# Altium schematic symbol library Schlib.SchLib: 107 symbols (part 2 of 3)
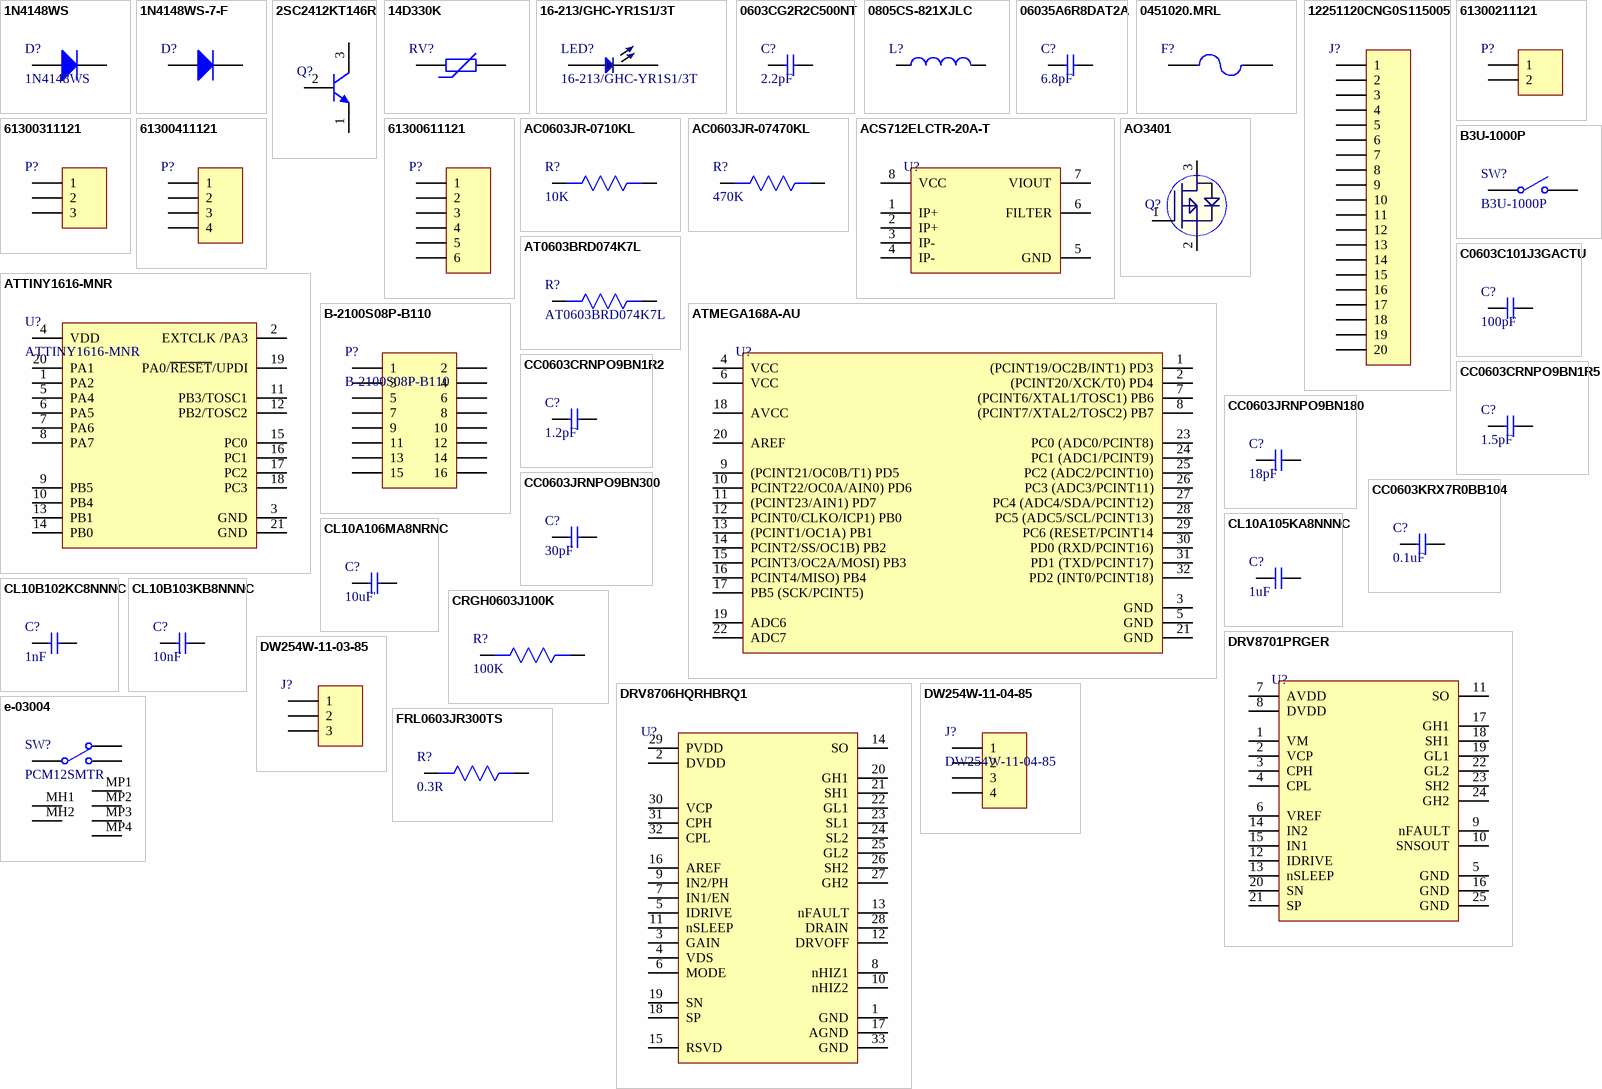
[diagram p3: symbols 1N4148WS to FRL0603JR300TS]

## DRV8701PRGER
designator U?
IC MOTOR DRIVER 0V-5.5V 24VQFN; Manufacturer: Texas Instruments; Manufacturer Part Number: DRV8701PRGER; Interface: PWM; Supplier 1: Mouser; RoHS: Yes; Category: Motor Drivers; Pricing 1: 1=2.52000, 10=2.28000, 25=2.15000, 50=2.15000, 100=1.83000, 250=1.72000, 500=1.51000, 1000=1.25000, 10000=1.25000 (USD); Mount: Surface Mount; Case/Package: VQFN; Min Operating Temperature: -40°C; Max Operating Temperature: 125°C; Packaging: Tape and Reel; Lead Free: Lead Free; RoHS Compliant: Yes; ComponentLink1URL: http://www.ti.com/lit/ds/symlink/drv8701.pdf?src-supplier=Digi-Key; ComponentLink1Description: http://www.ti.com/lit/ds/symlink/drv8701.pdf?src-supplier=Digi-Key; ComponentLink2URL: http://www.ti.com/general/docs/suppproductinfo.tsp?distId=10&amp;gotoUrl=http%3A%2F%2Fwww.ti.com%2Flit%2Fgpn%2Fdrv8701&src-supplier=Digi-Key; ComponentLink2Description: http://www.ti.com/general/docs/suppproductinfo.tsp?distId=10&amp;gotoUrl=http%3A%2F%2Fwww.ti.com%2Flit%2Fgpn%2Fdrv8701&src-supplier=Digi-Key; ComponentLink3URL: http://www.ti.com/general/docs/lit/getliterature.tsp?genericPartNumber=DRV8701&&fileType=pdf&src-supplier=Avnet; ComponentLink3Description: http://www.ti.com/general/docs/lit/getliterature.tsp?genericPartNumber=DRV8701&&fileType=pdf&src-supplier=Avnet; Supplier Part Number 1: 595-DRV8701PRGER
footprint 24-VQFN (4x4)
pins: 1 VM, 2 VCP, 3 CPH, 4 CPL, 5 GND, 6 VREF, 7 AVDD, 8 DVDD, 9 nFAULT, 10 SNSOUT, 11 SO, 12 IDRIVE, 13 nSLEEP, 14 IN2, 15 IN1, 16 GND, 17 GH1, 18 SH1, 19 GL1, 20 SN, 21 SP, 22 GL2, 23 SH2, 24 GH2, 25 GND

## DRV8706HQRHBRQ1
designator U?
AUTOMOTIVE 40-V H-BRIDGE SMART G; Manufacturer: Texas Instruments; Manufacturer Part Number: DRV8706HQRHBRQ1; Supplier 1: Mouser; RoHS: Yes; Pricing 1: 1=2.87000, 10=2.58000, 50=2.44000, 100=2.11000, 1000=1.57000, 10000=1.56000 (USD); Supplier Part Number 1: 595-DRV8706HQRHBRQ1
footprint 32 QFN (5x5)
pins: 1 GND, 2 DVDD, 3 GAIN, 4 VDS, 5 IDRIVE, 6 MODE, 7 IN1/EN, 8 nHIZ1, 9 IN2/PH, 10 nHIZ2, 11 nSLEEP, 12 DRVOFF, 13 nFAULT, 14 SO, 15 RSVD, 16 AREF, 17 AGND, 18 SP, 19 SN, 20 GH1, 21 SH1, 22 GL1, 23 SL1, 24 SL2, 25 GL2, 26 SH2, 27 GH2, 28 DRAIN, 29 PVDD, 30 VCP, 31 CPH, 32 CPL, 33 GND

## DW254W-11-03-85
designator J?
3 PIN 2.54mm 3A Female Headers ROHS; Manufacturer: DEALON; Manufacturer Part Number: DW254W-11-03-85; Insulation Height: 8.5mm; ComponentLink1Description: LCSC; ComponentLink1URL: https://lcsc.com/product-detail/span-style-background-color-ff0-Female-span-Headers_DEALON-DW254W-11-03-85_C2935993.html; Footprint: Custom
footprint DW254W-11-03-85 (3 pin  2.54mm 3A  Female Headers ROHS)
pins: 1, 2, 3

## DW254W-11-04-85
designator J?
4 PIN 2.54mm 3A Female Headers; Manufacturer: DEALON; Holes Structure: 1x4P; Holes Direction: side; Pitch: 2.54mm; Current Rating (Max): 3A; Mounting Type: Shrouded; ComponentLink1Description: LCSC; ComponentLink1URL: https://lcsc.com/product-detail/span-style-background-color-ff0-Female-span-Headers_DEALON-DW254W-11-04-85_C2935994.html
footprint DW254W-11-04-85 (2.54mm 3A Shrouded 1x4P side 8.5mm 4 1 Square Holes Plugin,P=2.54mm Female Headers ROHS)
pins: 1, 2, 3, 4

## e-03004
designator SW?, comment PCM12SMTR
SWITCH SLIDE SPDT 300MA 6V; Manufacturer: ITT C&K; Mechanical Life: 10000Cycles; Actuator Material: Nylon,Polyamide; Contact Resistance: 70mR; Insulation Resistance: 100mR; Switch Travel: 1.5mm; Switch Function: On-On; Actuator Type: Standard; Supplier 1: Digi-Key; Manufacturer Part Number: PCM12SMTR; Stock 1: 33578; Pricing 1: 1=0.91, 10=0.87, 25=0.8524, 50=0.7616, 100=0.7253, 250=0.7072, 500=0.5984, 1000=0.58027 (USD); Mount: Surface Mount; Contact Material: Copper Alloy,Copper,Silver; Contact Plating: Silver; Min Operating Temperature: -20°C; Max Operating Temperature: 85°C; Throw Configuration: SPDT; Max Voltage Rating (DC): 6V; Termination: Gull Wing; Voltage Rating (AC): 6V; Package Quantity: 1; Packaging: Tape and Reel; Voltage Rating (DC): 6V; Max Current Rating: 300mA; Contact Current Rating: 300mA; Current Rating: 300mA; Orientation: Right Angle; Length: 7.7mm; Width: 6.7mm; Depth: 5mm; Actuator Length: 1.5mm; REACH SVHC: No SVHC; Lead Free: Lead Free; ComponentLink1URL: https://www.ckswitches.com/media/1424/pcm.pdf?src-supplier=Digi-Key; ComponentLink1Description: https://www.ckswitches.com/media/1424/pcm.pdf?src-supplier=Digi-Key; ComponentLink2URL: https://products.avnet.com/shop/en/asia/switches-and-relays/switches/slide-switch/www.ckswitches.com/media/1424/pcm.pdf?src-supplier=Avnet+Asia; ComponentLink2Description: https://products.avnet.com/shop/en/asia/switches-and-relays/switches/slide-switch/www.ckswitches.com/media/1424/pcm.pdf?src-supplier=Avnet+Asia; ComponentLink3URL: http://www1.futureelectronics.com/doc/C%20&%20K%20COMPONENTS/PCM12SMTR.pdf?src-supplier=Future+Electronics; ComponentLink3Description: http://www1.futureelectronics.com/doc/C%20&%20K%20COMPONENTS/PCM12SMTR.pdf?src-supplier=Future+Electronics; ComponentLink4URL: http://www.farnell.com/datasheets/1789487.pdf?src-supplier=Onlinecomponents.com; ComponentLink4Description: http://www.farnell.com/datasheets/1789487.pdf?src-supplier=Onlinecomponents.com; ComponentLink5URL: http://www.farnell.com/datasheets/1789487.pdf?src-supplier=Element14; ComponentLink5Description: http://www.farnell.com/datasheets/1789487.pdf?src-supplier=Element14; ComponentLink6URL: http://www.farnell.com/datasheets/1789487.pdf?src-supplier=Mouser; ComponentLink6Description: http://www.farnell.com/datasheets/1789487.pdf?src-supplier=Mouser; Supplier Part Number 1: 401-2016-1-ND
footprint PCM12SMTR (SWITCH SLIDE SPDT 300MA 6V)
pins: 1, 2, 3, MH1, MH2, MP1, MP2, MP3, MP4

## FRL0603JR300TS
designator R?, comment 0.3R
1/10W Thick Film Resistors ±5% ±300ppm/℃ 0.3Ω -55℃~+155℃ 0603 Chip Resistor - Surface Mount ROHS; Manufacturer: FOJAN; Manufacturer Part Number: FRL0603JR300TS; ComponentLink1Description: LCSC; ComponentLink1URL: https://lcsc.com/product-detail/Chip-span-style-background-color-ff0-Resistor-span-Surface-Mount_FOJAN-FRL0603JR300TS_C2934256.html; Footprint: 0603
footprint Res0603
pins: 1, 2

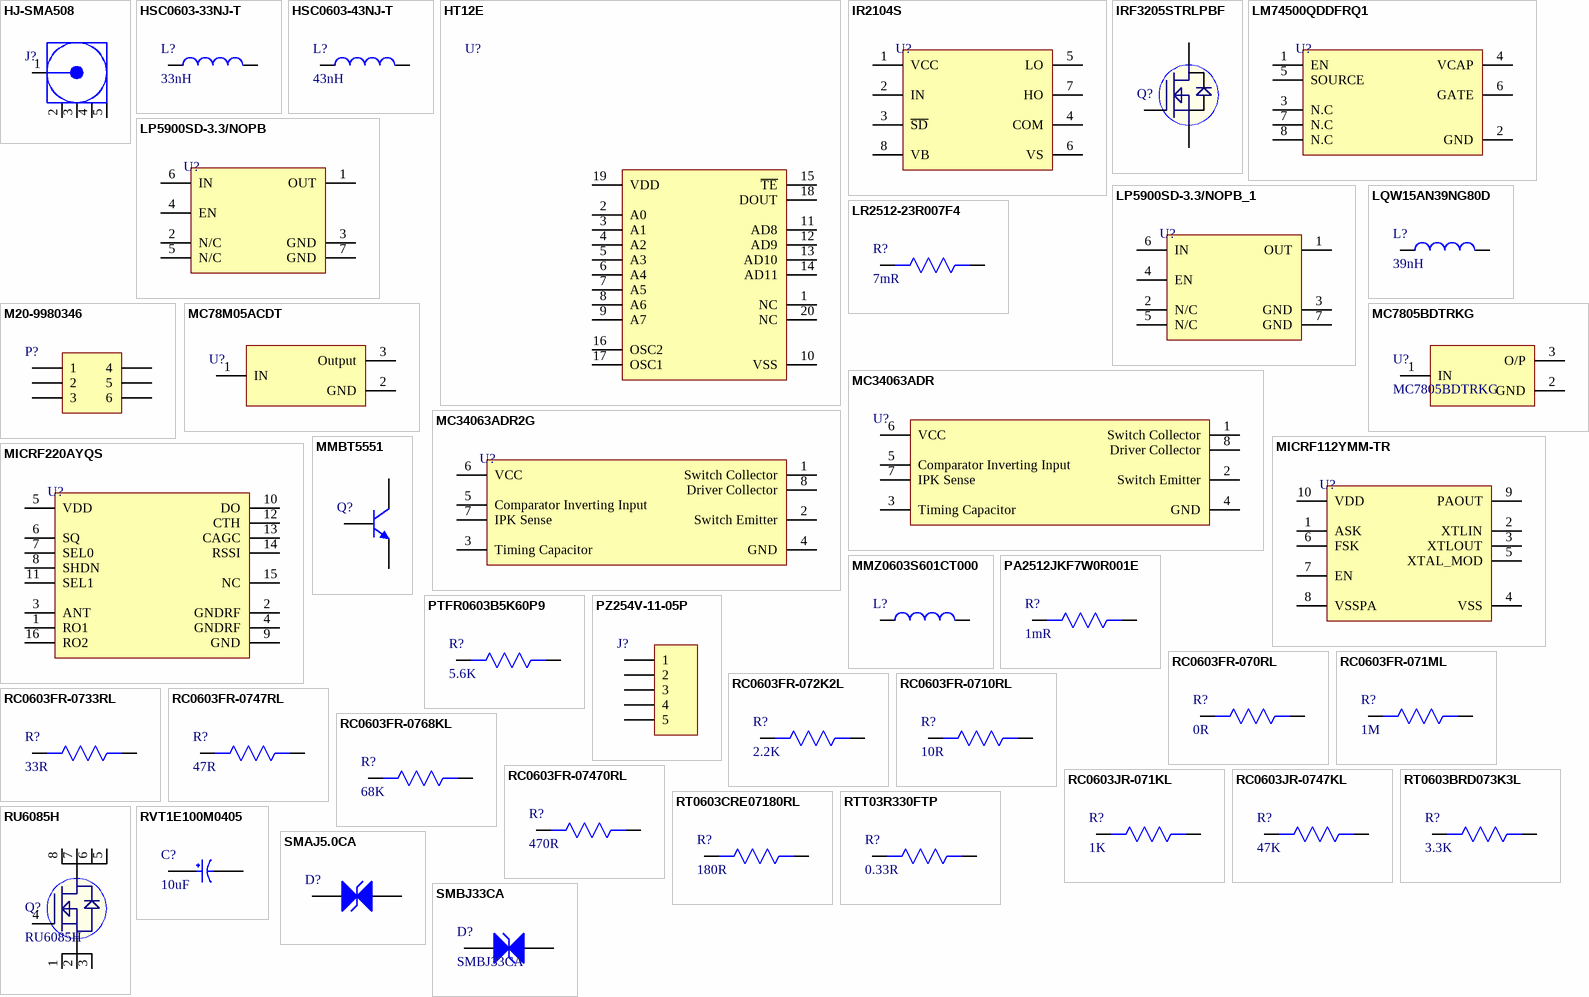
[diagram p1: symbols HJ-SMA508 to SMBJ33CA]

## HJ-SMA508
designator J?
1 Inner bore SMA Board Edge Bend -55℃~+155℃ 50Ω Plugin RF Connectors / Coaxial Connectors ROHS; Manufacturer: HJ Tech; Manufacturer Part Number: HJ-SMA508; Footprint: Custom; ComponentLink1Description: LCSC; ComponentLink1URL: https://lcsc.com/product-detail/RF-Connectors-Coaxial-Connectors_HJ-Tech-HJ-SMA508_C1509209.html
footprint HJ-SMA508
pins: 1 Signal "Signal Pin", 2 GND, 3 GND, 4 GND, 5 GND

## HSC0603-33NJ-T
designator L?, comment 33nH
600mA 33nH ±5% 220mΩ SMD,1.8x1.2x1.02mm Inductors (SMD) ROHS; Manufacturer: EMTEK; Manufacturer Part Number: HSC0603-33NJ-T; Value: 33nH; ComponentLink1Description: LCSC; ComponentLink1URL: https://www.lcsc.com/product-detail/Inductors-span-style-background-color-ff0-SMD-span_EMTEK-HSC0603-33NJ-T_C251779.html
footprint IND 0603
pins: 1, 2

## HSC0603-43NJ-T
designator L?, comment 43nH
600mA 43nH ±5% 280mΩ 0603 Inductors (SMD) ROHS; Manufacturer: EMTEK; Manufacturer Part Number: HSC0603-43NJ-T; Footprint: 0603; ComponentLink1Description: LCSC; ComponentLink1URL: https://www.lcsc.com/product-detail/Inductors-span-style-background-color-ff0-SMD-span_EMTEK-HSC0603-43NJ-T_C251785.html
footprint IND 0603
pins: 1, 2

## HT12E
designator U?
Remote Control Encoder, SMD, SOIC20; Manufacturer: Holtek; Manufacturer Part Number: HT12E-20SOP; Min Supply Voltage: 2.4V; Max Supply Voltage: 12V; Nominal Supply Current: 150uA; Supplier 1: RSComponents; RoHS: Yes; Category: Integrated Circuits (ICs); Stock 1: 1; Pricing 1: 38=1.61900, 76=1.41400, 190=1.33600, 380=1.30900, 760=1.28200 (USD); Case/Package: SOP; Number of Pins: 20; Min Operating Temperature: -20°C; Max Operating Temperature: 75°C; Length: 12.8mm; Width: 7.5mm; Height: 2.35mm; REACH SVHC: No SVHC; ComponentLink1URL: https://datasheet.ciiva.com/1167/57851-1167180.pdf?src-supplier=Element14; ComponentLink1Description: https://datasheet.ciiva.com/1167/57851-1167180.pdf?src-supplier=Element14; Supplier Part Number 1: 8850709
footprint SOP-20 (300 Mil)
pins: 1 NC, 2 A0, 3 A1, 4 A2, 5 A3, 6 A4, 7 A5, 8 A6, 9 A7, 10 VSS, 11 AD8, 12 AD9, 13 AD10, 14 AD11, 15 ~{TE}, 16 OSC2, 17 OSC1, 18 DOUT, 19 VDD, 20 NC

## IR2104S
designator U?
IC DRIVER HIGH/LOW SIDE 8SOIC; Manufacturer: Infineon; Manufacturer Part Number: IR2104STRPBF; Number of Outputs: 2; Max Output Current: 360mA; Min Supply Voltage: 10V; Max Supply Voltage: 20V; Fall Time: 90ns; Propagation Delay: 680ns; Channel Type: Synchronous; Supplier 1: Newark; RoHS: Yes; Category: Gate Drivers; Stock 1: 1645; Pricing 1: 1=3.54000, 10=3.19000, 25=3.01000 (USD); Mount: Surface Mount; Case/Package: SOIC; Number of Pins: 8; Min Operating Temperature: -40°C; Max Operating Temperature: 150°C; Package Quantity: 1; Packaging: Cut Tape; Number of Drivers: 2; Output Current: 360mA; Number of Channels: 2; Length: 0.196inch; Width: 0.157inch; Height: 0.059inch; RoHS Compliant: Yes; REACH SVHC: No SVHC; Lead Free: Lead Free; Halogen Free: Not Halogen Free; Supplier Part Number 1: 40M8006
footprint SOIC-8
pins: 1 VCC, 2 IN, 3 ~{SD}, 4 COM, 5 LO, 6 VS, 7 HO, 8 VB

## IRF3205STRLPBF
designator Q?
MOSFET N-CH 55V 110A D2PAK; Manufacturer: Infineon; Manufacturer Part Number: IRF3205STRLPBF; Input Capacitance: 3.247nF; Power Dissipation: 200W; Gate to Source Voltage (Vgs): 20V; Rds On Max: 8mR; Turn-Off Delay Time: 50ns; Turn-On Delay Time: 14ns; Threshold Voltage: 4V; Supplier 1: Newark; RoHS: Yes; Category: MOSFETs; Pricing 1: 1=2.87000, 10=2.59000, 25=2.42000, 50=2.25000, 100=2.09000, 250=1.90000, 500=1.71000 (USD); Mount: Surface Mount; Case/Package: D2PAK; Number of Pins: 3; Min Operating Temperature: -55°C; Max Operating Temperature: 175°C; Packaging: Cut Tape; Continuous Drain Current (ID): 110A; Drain to Source Breakdown Voltage: 55V; Drain to Source Voltage (Vdss): 55V; Max Power Dissipation: 200W; Drain to Source Resistance: 8mR; Max Dual Supply Voltage: 55V; Length: 0.42inch; Width: 0.38inch; Height: 0.19inch; Lead Free: Contains Lead; RoHS Compliant: Yes; REACH SVHC: No SVHC; Halogen Free: Halogen Free; Supplier Part Number 1: 42Y0386
footprint D2PAK
pins: 1 G, 2 D, 3 S

## LM74500QDDFRQ1
designator U?
REVERSE POLARITY PROTECTION CONT; Manufacturer: Texas Instruments; Manufacturer Part Number: LM74500QDDFRQ1; Supplier 1: Mouser; RoHS: No; Category: Battery Management; Pricing 1: 1=1.77000, 10=1.60000, 50=1.51000, 100=1.29000, 1000=0.87600, 10000=0.87500 (USD); Supplier Part Number 1: 595-LM74500QDDFRQ1
footprint TSOT-23-8
pins: 1 EN, 2 GND, 3 N.C, 4 VCAP, 5 SOURCE, 6 GATE, 7 N.C, 8 N.C

## LP5900SD-3.3/NOPB
designator U?
IC REG LINEAR 3.3V 150MA 6WSON; Manufacturer: TI National Semiconductor; Manufacturer Part Number: LP5900SD-3.3/NOPB; Dropout Voltage: 80mV; Number of Outputs: 1; Min Input Voltage: 2.5V; Max Input Voltage: 5.5V; Polarity: Positive; Quiescent Current: 50uA; Output Voltage Accuracy: 2%; Output Type: Fixed; Max Supply Current: 230uA; Power Supply Rejection Ratio (PSRR): 40dB; Supplier 1: Digi-Key; RoHS: Yes; Category: Voltage Regulators - Linear; Stock 1: 36260; Pricing 1: 1=1.01000, 10=0.90700, 25=0.86080, 100=0.70700, 250=0.66092, 500=0.58406 (USD); Mount: Surface Mount; Number of Pins: 6; Min Operating Temperature: -40°C; Max Operating Temperature: 85°C; Output Voltage: 3.3V; Output Current: 150mA; Package Quantity: 1000; Packaging: Tape and Reel; Max Output Current: 150mA; Nominal Output Voltage: 3.3V; Accuracy: 2%; Series: -; Number of Regulators: 1; Max Supply Voltage: 5.5V; Min Supply Voltage: 2.5V; Termination: SMD/SMT; Output Configuration: Positive; Length: 2.2mm; Width: 2.5mm; Height: 0.8mm; Radiation Hardening: No; REACH SVHC: No SVHC; Lead Free: Lead Free; ComponentLink1URL: https://datasheet.ciiva.com/3223/lp5900-3223991.pdf?src-supplier=Avnet; ComponentLink1Description: https://datasheet.ciiva.com/3223/lp5900-3223991.pdf?src-supplier=Avnet; ComponentLink2URL: https://datasheet.ciiva.com/6598/lp5900-6598143.pdf?src-supplier=Digi-Key; ComponentLink2Description: https://datasheet.ciiva.com/6598/lp5900-6598143.pdf?src-supplier=Digi-Key; ComponentLink3URL: https://datasheet.ciiva.com/6598/lp5900-6598142.pdf?src-supplier=Digi-Key; ComponentLink3Description: https://datasheet.ciiva.com/6598/lp5900-6598142.pdf?src-supplier=Digi-Key; Supplier Part Number 1: LP5900SD-3.3/NOPBCT-ND
footprint WSON-6
pins: 1 OUT, 2 N/C, 3 GND, 4 EN, 5 N/C, 6 IN, 7 GND

## LP5900SD-3.3/NOPB_1
designator U?
IC REG LINEAR 3.3V 150MA 6WSON; Manufacturer: TI National Semiconductor; Manufacturer Part Number: LP5900SD-3.3/NOPB; Dropout Voltage: 80mV; Number of Outputs: 1; Min Input Voltage: 2.5V; Max Input Voltage: 5.5V; Polarity: Positive; Quiescent Current: 50uA; Output Voltage Accuracy: 2%; Output Type: Fixed; Max Supply Current: 230uA; Power Supply Rejection Ratio (PSRR): 40dB; Supplier 1: Digi-Key; RoHS: Yes; Category: Voltage Regulators - Linear; Stock 1: 36260; Pricing 1: 1=1.01000, 10=0.90700, 25=0.86080, 100=0.70700, 250=0.66092, 500=0.58406 (USD); Mount: Surface Mount; Number of Pins: 6; Min Operating Temperature: -40°C; Max Operating Temperature: 85°C; Output Voltage: 3.3V; Output Current: 150mA; Package Quantity: 1000; Packaging: Tape and Reel; Max Output Current: 150mA; Nominal Output Voltage: 3.3V; Accuracy: 2%; Series: -; Number of Regulators: 1; Max Supply Voltage: 5.5V; Min Supply Voltage: 2.5V; Termination: SMD/SMT; Output Configuration: Positive; Length: 2.2mm; Width: 2.5mm; Height: 0.8mm; Radiation Hardening: No; REACH SVHC: No SVHC; Lead Free: Lead Free; ComponentLink1URL: https://datasheet.ciiva.com/3223/lp5900-3223991.pdf?src-supplier=Avnet; ComponentLink1Description: https://datasheet.ciiva.com/3223/lp5900-3223991.pdf?src-supplier=Avnet; ComponentLink2URL: https://datasheet.ciiva.com/6598/lp5900-6598143.pdf?src-supplier=Digi-Key; ComponentLink2Description: https://datasheet.ciiva.com/6598/lp5900-6598143.pdf?src-supplier=Digi-Key; ComponentLink3URL: https://datasheet.ciiva.com/6598/lp5900-6598142.pdf?src-supplier=Digi-Key; ComponentLink3Description: https://datasheet.ciiva.com/6598/lp5900-6598142.pdf?src-supplier=Digi-Key; Supplier Part Number 1: LP5900SD-3.3/NOPBCT-ND
footprint WSON-6
pins: 1 OUT, 2 N/C, 3 GND, 4 EN, 5 N/C, 6 IN, 7 GND

## LQW15AN39NG80D
designator L?, comment 39nH
FIXED IND 39NH 530MA 456MOHM SMD; Manufacturer: Murata; Manufacturer Part Number: LQW15AN39NG80D; Core Material: Non-Magnetic; Shielding: Unshielded; Tolerance: 2%; DC Resistance (DCR): 456mR; Self Resonant Frequency: 3.4GHz; Test Frequency: 100MHz; Q Factor: 28; Supplier 1: Arrow Electronics; RoHS: Yes; Category: Fixed Inductors; Stock 1: 7835; Pricing 1: 1=0.25260, 10=0.20140, 25=0.19280, 100=0.14770, 250=0.13910, 500=0.12490, 1000=0.10220, 3000=0.08400, 6000=0.08290 (USD); Mount: Surface Mount; Case/Package: 0402; Case Code (Metric): 1005; Case Code (Imperial): 0402; Min Operating Temperature: -55°C; Max Operating Temperature: 125°C; Current Rating: 530mA; Packaging: Tape and Reel; Package Quantity: 1; Resistor Type: Wirewound; Inductance: 39nH; Max DC Current: 530mA; Termination: SMD/SMT; Length: 0.039inch; Width: 0.024inch; Height: 0.5mm; Height - Seated (Max): 0.024inch; RoHS Compliant: Yes; ComponentLink1URL: https://datasheet.ciiva.com/24054/product-260692-24054907.pdf?src-supplier=Mouser; ComponentLink1Description: https://datasheet.ciiva.com/24054/product-260692-24054907.pdf?src-supplier=Mouser; ComponentLink2URL: https://datasheet.ciiva.com/29696/l0075e-29696874.pdf?src-supplier=Digi-Key; ComponentLink2Description: https://datasheet.ciiva.com/29696/l0075e-29696874.pdf?src-supplier=Digi-Key; ComponentLink3URL: https://datasheet.ciiva.com/29696/l0075e-29696875.pdf?src-supplier=Digi-Key; ComponentLink3Description: https://datasheet.ciiva.com/29696/l0075e-29696875.pdf?src-supplier=Digi-Key; ComponentLink4URL: https://datasheet.ciiva.com/29696/l0075e-29696876.pdf?src-supplier=Digi-Key; ComponentLink4Description: https://datasheet.ciiva.com/29696/l0075e-29696876.pdf?src-supplier=Digi-Key; Supplier Part Number 1: LQW15AN39NG80D
footprint IND 0402
pins: 1, 2

## LR2512-23R007F4
designator R?, comment 7mR
3W 7mΩ 100A Current Sensing Resistors ±25ppm/℃ ±1% 2512 /Shunt Resistors ROHS; Manufacturer: RALEC; Manufacturer Part Number: LR2512-23R007F4; Value: 7mΩ; ComponentLink1Description: LCSC; ComponentLink1URL: https://lcsc.com/product-detail/Current-Sense-Resistors-Shunt-Resistors_RALEC-LR2512-23R007F4_C2681052.html; Footprint: 2512
footprint RES 2512 (0.033O ±1% 2W ±1800ppm/°C 2512 Low Resistors & Current Sense Resistors - Surface Mount RoHS)
pins: 1, 2

## M20-9980346
designator P?
CONN HEADER VERT 6POS 2.54MM; Manufacturer: Harwin; Manufacturer Part Number: M20-9980346; Number of Contacts: 6; Contact Resistance: 25mR; Current Rating: 3A; Gender: Male; Insulation Resistance: 10GR; Connector Type: Male Pin; Row Spacing: 0.1inch; Supplier 1: Digi-Key; Stock 1: 19517; Pricing 1: 1=0.24, 10=0.229, 100=0.1586, 500=0.1342, 1000=0.1098, 5000=0.0976, 10000=0.08845 (USD); Mount: Through Hole; Contact Plating: Tin; Color: Black; Contact Material: Bronze,Brass; Housing Color: Black; Housing Material: Nylon; Min Operating Temperature: -40°C; Max Operating Temperature: 105°C; Number of Rows: 2; Termination: Solder; Package Quantity: 1000; Packaging: Bag; Max Current Rating: 3A; Number of Positions: 6; Orientation: Straight; Length: 7.62mm; Pitch: 2.54mm; Contact Mating Length: 0.24inch; Depth: 5.08mm; Radiation Hardening: No; REACH SVHC: No SVHC; ComponentLink1URL: http://uk.rs-online.com/webdocs/1406/0900766b81406898.pdf?src-supplier=RSComponents; ComponentLink1Description: http://uk.rs-online.com/webdocs/1406/0900766b81406898.pdf?src-supplier=RSComponents; ComponentLink2URL: https://www.verical.com/server-webapp/html/getDatasheet?partID=483857&src-supplier=Verical; ComponentLink2Description: https://www.verical.com/server-webapp/html/getDatasheet?partID=483857&src-supplier=Verical; ComponentLink3URL: http://www.farnell.com/datasheets/2368211.pdf?src-supplier=Element14; ComponentLink3Description: http://www.farnell.com/datasheets/2368211.pdf?src-supplier=Element14; Supplier Part Number 1: 952-2121-ND
footprint HDR2X3 (Connector; Header; 3x2 Position)
pins: 1, 2, 3, 4, 5, 6

## MC78M05ACDT
designator U?
IC REG LINEAR 5V 500MA DPAK; Manufacturer: ON Semiconductor; Manufacturer Part Number: MC78M05ACDTRKG; Number of Outputs: 1; Power Rating: 5W; Dropout Voltage: 2V; Max Input Voltage: 35V; Min Input Voltage: 7V; Polarity: Positive; Quiescent Current: 6mA; Max Output Voltage: 5.1V; Output Voltage Accuracy: 2%; Power Supply Rejection Ratio (PSRR): 80dB; Output Type: Fixed; Supplier 1: Arrow Electronics; RoHS: Yes; Category: Voltage Regulators - Linear; Stock 1: 4440; Pricing 1: 1=0.50430, 10=0.50340, 25=0.49850, 100=0.34200, 250=0.33860, 500=0.33520, 1000=0.23420, 3000=0.19890 (USD); Mount: Surface Mount; Case/Package: DPAK; Number of Pins: 3; Min Operating Temperature: 0°C; Max Operating Temperature: 125°C; Nominal Output Voltage: 5V; Packaging: Tape and Reel; Max Output Current: 500mA; Output Voltage: 5V; Output Current: 500mA; Package Quantity: 1; Number of Regulators: 1; Min Output Voltage: 5V; Accuracy: 2%; Series: -; Length: 6.73mm; Width: 6.22mm; Height: 2.38mm; Radiation Hardening: No; REACH SVHC: No SVHC; Lead Free: Lead Free; Halogen Free: Halogen Free; RoHS Compliant: Yes; ComponentLink1URL: https://datasheet.ciiva.com/8233/mc78m00-d-8233193.pdf?src-supplier=Avnet; ComponentLink1Description: https://datasheet.ciiva.com/8233/mc78m00-d-8233193.pdf?src-supplier=Avnet; ComponentLink2URL: https://datasheet.ciiva.com/2042/mc78m00-d-2042507.pdf?src-supplier=Digi-Key; ComponentLink2Description: https://datasheet.ciiva.com/2042/mc78m00-d-2042507.pdf?src-supplier=Digi-Key; ComponentLink3URL: https://datasheet.ciiva.com/8234/mc78m00-d-8234043.pdf?src-supplier=Avnet; ComponentLink3Description: https://datasheet.ciiva.com/8234/mc78m00-d-8234043.pdf?src-supplier=Avnet; ComponentLink4URL: https://datasheet.ciiva.com/2042/mc78m00-d-2042508.pdf?src-supplier=Digi-Key; ComponentLink4Description: https://datasheet.ciiva.com/2042/mc78m00-d-2042508.pdf?src-supplier=Digi-Key; ComponentLink5URL: https://datasheet.ciiva.com/2042/mc78m00-d-2042509.pdf?src-supplier=Digi-Key; ComponentLink5Description: https://datasheet.ciiva.com/2042/mc78m00-d-2042509.pdf?src-supplier=Digi-Key; ComponentLink6URL: https://datasheet.ciiva.com/4882/mc78m00-d-88441-4882285.pdf?src-supplier=Mouser; ComponentLink6Description: https://datasheet.ciiva.com/4882/mc78m00-d-88441-4882285.pdf?src-supplier=Mouser; ComponentLink7URL: https://datasheet.ciiva.com/16455/mc78m00-d-16455407.pdf?src-supplier=Future+Electronics; ComponentLink7Description: https://datasheet.ciiva.com/16455/mc78m00-d-16455407.pdf?src-supplier=Future+Electronics; Supplier Part Number 1: MC78M05ACDTRKG
footprint DPAK
pins: 1 IN, 2 GND, 3 Output

## MC7805BDTRKG
designator U?
IC REG LINEAR 5V 1A DPAK; Supplier 1: RSComponents; Supplier Part Number 1: 8056470P
footprint DPAK
pins: 1 IN, 2 GND, 3 O/P

## MC34063ADR
designator U?
IC REG BUCK BST ADJ 1.5A 8SOIC; Manufacturer: Texas Instruments; Manufacturer Part Number: MC34063ADR; Output Voltage: 40V; Number of Outputs: 1; Switching Frequency: 100kHz; Synchronous Rectifier: No; Output Type: Adjustable; Max Output Current: 750mA; Min Input Voltage: 3V; Min Output Voltage: 1.55V; Quiescent Current: 4mA; Topology: Flyback,SEPIC; Supplier 1: Digi-Key; RoHS: Yes; Category: Power Supply Modules; Stock 1: 17204; Pricing 1: 1=0.78000, 10=0.68400, 25=0.64240, 100=0.52420, 250=0.48688, 500=0.41438, 1000=0.34206 (USD); Case/Package: D; Number of Pins: 8; Weight: 0.002561oz; Contact Plating: Gold; Min Operating Temperature: 0°C; Max Operating Temperature: 70°C; Output Current: 1.5A; Packaging: Tape and Reel; Package Quantity: 1; Max Input Voltage: 40V; Max Output Voltage: 40V; Termination: SMD/SMT; Radiation Hardening: No; RoHS Compliant: Yes; Lead Free: Lead Free; REACH SVHC: No SVHC; ComponentLink1URL: https://datasheet.ciiva.com/7408/1862376-7408060.pdf?src-supplier=Newark; ComponentLink1Description: https://datasheet.ciiva.com/7408/1862376-7408060.pdf?src-supplier=Newark; ComponentLink2URL: https://datasheet.ciiva.com/2025/mc33063a-2025162.pdf?src-supplier=Digi-Key; ComponentLink2Description: https://datasheet.ciiva.com/2025/mc33063a-2025162.pdf?src-supplier=Digi-Key; ComponentLink3URL: https://datasheet.ciiva.com/2025/mc33063a-2025161.pdf?src-supplier=Digi-Key; ComponentLink3Description: https://datasheet.ciiva.com/2025/mc33063a-2025161.pdf?src-supplier=Digi-Key; ComponentLink4URL: https://datasheet.ciiva.com/2025/mc33063a-2025163.pdf?src-supplier=Digi-Key; ComponentLink4Description: https://datasheet.ciiva.com/2025/mc33063a-2025163.pdf?src-supplier=Digi-Key; Supplier Part Number 1: 296-17765-1-ND
footprint SOIC-8
pins: 1 Switch Collector, 2 Switch Emitter, 3 Timing Capacitor, 4 GND, 5 Comparator Inverting Input, 6 VCC, 7 IPK Sense, 8 Driver Collector

## MC34063ADR2G
designator U?
IC REG BUCK BOOST INV ADJ 8SOIC; Manufacturer: ON Semiconductor; Manufacturer Part Number: MC34063ADR2G; Number of Outputs: 1; Output Voltage: 40V; Max Output Current: 1.5A; Min Input Voltage: 3V; Switching Frequency: 100kHz; Synchronous Rectifier: No; Min Output Voltage: 1.25V; Output Type: Adjustable; Supplier 1: Arrow Electronics; RoHS: Yes; Category: Voltage Regulators - Switching; Stock 1: 2000; Pricing 1: 1=0.59300, 10=0.47930, 25=0.47460, 100=0.29030, 250=0.28740, 500=0.28460, 1000=0.25300, 3000=0.22150 (USD); Mount: Surface Mount; Case/Package: SOIC; Number of Pins: 8; Contact Plating: Tin,Matte; Min Operating Temperature: 0°C; Max Operating Temperature: 70°C; Package Quantity: 1; Packaging: Tape and Reel; Output Current: 1.5A; Max Input Voltage: 40V; Max Output Voltage: 40V; Series: -; Switching Frequency-Max: 100kHz; Length: 5mm; Width: 4mm; Height: 1.5mm; Radiation Hardening: No; REACH SVHC: No SVHC; Lead Free: Lead Free; Halogen Free: Halogen Free; RoHS Compliant: Yes; ComponentLink1URL: https://datasheet.ciiva.com/34301/871666-34301629.pdf?src-supplier=Jameco; ComponentLink1Description: https://datasheet.ciiva.com/34301/871666-34301629.pdf?src-supplier=Jameco; ComponentLink2URL: https://datasheet.ciiva.com/15112/getdatasheetpartid-59933-15112667.pdf?src-supplier=Verical; ComponentLink2Description: https://datasheet.ciiva.com/15112/getdatasheetpartid-59933-15112667.pdf?src-supplier=Verical; ComponentLink3URL: https://datasheet.ciiva.com/2025/mc34063a-d-2025168.pdf?src-supplier=Digi-Key; ComponentLink3Description: https://datasheet.ciiva.com/2025/mc34063a-d-2025168.pdf?src-supplier=Digi-Key; ComponentLink4URL: https://datasheet.ciiva.com/3217/mc34063a-d-3217624.pdf?src-supplier=Avnet; ComponentLink4Description: https://datasheet.ciiva.com/3217/mc34063a-d-3217624.pdf?src-supplier=Avnet; ComponentLink5URL: https://datasheet.ciiva.com/3217/mc34063a-d-3217493.pdf?src-supplier=Avnet; ComponentLink5Description: https://datasheet.ciiva.com/3217/mc34063a-d-3217493.pdf?src-supplier=Avnet; ComponentLink6URL: https://datasheet.ciiva.com/2025/mc34063a-d-2025169.pdf?src-supplier=Digi-Key; ComponentLink6Description: https://datasheet.ciiva.com/2025/mc34063a-d-2025169.pdf?src-supplier=Digi-Key; ComponentLink7URL: https://datasheet.ciiva.com/2025/mc34063a-d-2025167.pdf?src-supplier=Digi-Key; ComponentLink7Description: https://datasheet.ciiva.com/2025/mc34063a-d-2025167.pdf?src-supplier=Digi-Key; Supplier Part Number 1: MC34063ADR2G
footprint SOIC-8
pins: 1 Switch Collector, 2 Switch Emitter, 3 Timing Capacitor, 4 GND, 5 Comparator Inverting Input, 6 VCC, 7 IPK Sense, 8 Driver Collector

## MICRF112YMM-TR
designator U?
RF TX IC ASK 300-450MHZ 10TFSOP; Manufacturer: Microchip; Manufacturer Part Number: MICRF112YMM-TR; Nominal Supply Current: 6.9mA; Max Supply Voltage: 3.6V; Min Supply Voltage: 1.8V; Frequency: 450MHz; Data Rate: 50Kbps; Current - Transmitting: 11mA; Operating Frequency: 300 MHz to 450 MHz; Output Power (dBm): 10dBm; Supplier 1: Arrow Electronics; RoHS: Yes; Category: Interface ICs; Stock 1: 2495; Pricing 1: 1=0.91840, 10=0.90440, 25=0.89050, 100=0.87650, 250=0.86260, 500=0.84860, 1000=0.83470, 3000=0.82070 (USD); Case/Package: MSOP; Min Operating Temperature: -40°C; Max Operating Temperature: 125°C; Packaging: Tape and Reel; Package Quantity: 2500; Series: QwikRadio®; Supply Current: 6.9mA; Length: 3mm; Depth: 3mm; RoHS Compliant: Yes; ComponentLink1URL: https://datasheet.ciiva.com/16212/micrf112-16212615.pdf?src-supplier=Future+Electronics; ComponentLink1Description: https://datasheet.ciiva.com/16212/micrf112-16212615.pdf?src-supplier=Future+Electronics; ComponentLink2URL: https://datasheet.ciiva.com/2802/micrf112-2802327.pdf?src-supplier=Digi-Key; ComponentLink2Description: https://datasheet.ciiva.com/2802/micrf112-2802327.pdf?src-supplier=Digi-Key; Supplier Part Number 1: MICRF112YMM-TR
footprint 10-MSOP
pins: 1 ASK, 2 XTLIN, 3 XTLOUT, 4 VSS, 5 XTAL_MOD, 6 FSK, 7 EN, 8 VSSPA, 9 PAOUT, 10 VDD

## MICRF220AYQS
designator U?
RF RX ASK/OOK 300-450MHZ 16QSOP; Manufacturer: Microchip; Manufacturer Part Number: MICRF220AYQS; Data Rate: 20Kbps; Nominal Supply Current: 4.3mA; Min Supply Voltage: 3V; Max Supply Voltage: 3.6V; Frequency: 450MHz; Sensitivity: -112.5dBm; Current - Receiving: 6mA; Bandwidth: 330kHz; Operating Frequency: 300 MHz to 450 MHz; Min Frequency: 300MHz; Supplier 1: Arrow Electronics; RoHS: Yes; Category: Interface ICs; Stock 1: 5131; Pricing 1: 1=2.15000 (USD); Mount: Surface Mount; Case/Package: QSOP; Number of Pins: 16; Min Operating Temperature: -40°C; Max Operating Temperature: 105°C; Package Quantity: 98; Packaging: Rail/Tube; Series: QwikRadio®; Supply Current: 4.3mA; Max Frequency: 450MHz; Length: 4.9mm; Width: 3.91mm; Height: 1.47mm; Depth: 3.91mm; Radiation Hardening: No; RoHS Compliant: Yes; REACH SVHC: No SVHC; Lead Free: Lead Free; ComponentLink1URL: https://datasheet.ciiva.com/2798/micrf220-2798468.pdf?src-supplier=Digi-Key; ComponentLink1Description: https://datasheet.ciiva.com/2798/micrf220-2798468.pdf?src-supplier=Digi-Key; ComponentLink2URL: https://datasheet.ciiva.com/30475/0900766b81133813-30475820.pdf?src-supplier=RSComponents; ComponentLink2Description: https://datasheet.ciiva.com/30475/0900766b81133813-30475820.pdf?src-supplier=RSComponents; ComponentLink3URL: https://datasheet.ciiva.com/1164/micrf220-1164232.pdf?src-supplier=Element14; ComponentLink3Description: https://datasheet.ciiva.com/1164/micrf220-1164232.pdf?src-supplier=Element14; Supplier Part Number 1: MICRF220AYQS
footprint 16-QSOP
pins: 1 RO1, 2 GNDRF, 3 ANT, 4 GNDRF, 5 VDD, 6 SQ, 7 SEL0, 8 SHDN, 9 GND, 10 DO, 11 SEL1, 12 CTH, 13 CAGC, 14 RSSI, 15 NC, 16 RO2

## MMBT5551
designator Q?
TRANS NPN 160V 0.6A SOT23; Manufacturer: ON Semiconductor; Manufacturer Part Number: MMBT5551LT1G; Max Power Dissipation: 225mW; Max Collector Current: 600mA; Collector Base Voltage (VCBO): 180V; Emitter Base Voltage (VEBO): 6V; Element Configuration: Single; Number of Elements: 1; hFE Min: 80; Power Dissipation: 300mW; Collector Emitter Saturation Voltage: 150mV; Collector-emitter Voltage-Max: 200mV; Supplier 1: Newark; RoHS: Yes; Category: BJTs; Stock 1: 100073; Pricing 1: 1=0.20900, 5=0.20900, 10=0.15200, 100=0.08400, 500=0.06700 (USD); Case/Package: SOT-23-3; Number of Pins: 3; Weight: 0.01lb; Contact Plating: Tin,Matte; Min Operating Temperature: -55°C; Max Operating Temperature: 150°C; Collector Emitter Voltage (VCEO): 160V; Packaging: Tape and Reel; Collector Emitter Breakdown Voltage: 160V; Polarity: NPN; Package Quantity: 1; Max Breakdown Voltage: 160V; Voltage Rating (DC): 160V; Current Rating: 600mA; Series: -; Length: 2.9mm; Width: 1.3mm; Height: 0.94mm; Radiation Hardening: No; Lead Free: Lead Free; RoHS Compliant: Yes; REACH SVHC: No SVHC; ComponentLink1URL: https://datasheet.ciiva.com/34303/2011387-34303825.pdf?src-supplier=Jameco; ComponentLink1Description: https://datasheet.ciiva.com/34303/2011387-34303825.pdf?src-supplier=Jameco; ComponentLink2URL: https://datasheet.ciiva.com/15139/getdatasheetpartid-92641-15139178.pdf?src-supplier=Verical; ComponentLink2Description: https://datasheet.ciiva.com/15139/getdatasheetpartid-92641-15139178.pdf?src-supplier=Verical; ComponentLink3URL: https://datasheet.ciiva.com/976/mmbt5550lt1-d-976512.pdf?src-supplier=Digi-Key; ComponentLink3Description: https://datasheet.ciiva.com/976/mmbt5550lt1-d-976512.pdf?src-supplier=Digi-Key; ComponentLink4URL: https://datasheet.ciiva.com/16984/0900766b8078eb1b-16984971.pdf?src-supplier=Allied+Electronics; ComponentLink4Description: https://datasheet.ciiva.com/16984/0900766b8078eb1b-16984971.pdf?src-supplier=Allied+Electronics; ComponentLink5URL: https://datasheet.ciiva.com/7972/mmbt5550lt1-d-7972073.pdf?src-supplier=Element14; ComponentLink5Description: https://datasheet.ciiva.com/7972/mmbt5550lt1-d-7972073.pdf?src-supplier=Element14; ComponentLink6URL: https://datasheet.ciiva.com/7972/mmbt5550lt1-d-7972075.pdf?src-supplier=Element14; ComponentLink6Description: https://datasheet.ciiva.com/7972/mmbt5550lt1-d-7972075.pdf?src-supplier=Element14; ComponentLink7URL: https://datasheet.ciiva.com/4722/mmbt5550lt1-d-111393-4722711.pdf?src-supplier=Mouser; ComponentLink7Description: https://datasheet.ciiva.com/4722/mmbt5550lt1-d-111393-4722711.pdf?src-supplier=Mouser; ComponentLink8URL: https://datasheet.ciiva.com/11197/mmbt5550lt1-d-11197404.pdf?src-supplier=Avnet; ComponentLink8Description: https://datasheet.ciiva.com/11197/mmbt5550lt1-d-11197404.pdf?src-supplier=Avnet; ComponentLink9URL: https://datasheet.ciiva.com/16342/mmbt5550lt1-d-16342687.pdf?src-supplier=Future+Electronics; ComponentLink9Description: https://datasheet.ciiva.com/16342/mmbt5550lt1-d-16342687.pdf?src-supplier=Future+Electronics; ComponentLink10URL: https://datasheet.ciiva.com/976/mmbt5550lt1-d-976513.pdf?src-supplier=Digi-Key; ComponentLink10Description: https://datasheet.ciiva.com/976/mmbt5550lt1-d-976513.pdf?src-supplier=Digi-Key; ComponentLink11URL: https://datasheet.ciiva.com/976/mmbt5550lt1-d-976511.pdf?src-supplier=Digi-Key; ComponentLink11Description: https://datasheet.ciiva.com/976/mmbt5550lt1-d-976511.pdf?src-supplier=Digi-Key; Supplier Part Number 1: 58M9157
footprint SOT23-3 (SOT23, 3-Leads, Body 2.9x1.3mm, Pitch 0.95mm, Lead Span 2.3mm - Reverse Pinning, IPC High Density)
pins: 1 B, 2 E, 3 C

## MMZ0603S601CT000
designator L?
FERRITE BEAD 600 OHM 0201 1LN; Manufacturer: TDK; Manufacturer Part Number: MMZ0603S601CT000; Impedance: 600R; Tolerance: 25%; DC Resistance (DCR): 1.45R; Max DC Current: 100mA; Supplier 1: Digi-Key; RoHS: Yes; Category: Inductors; Stock 1: 1540; Pricing 1: 1=0.12000, 10=0.09900, 25=0.07680, 50=0.06380, 100=0.05500, 250=0.04400, 500=0.03960, 1000=0.03300, 5000=0.03080 (USD); Mount: Surface Mount; Case/Package: 0201; Core Material: Ferrite; Case Code (Metric): 0603; Case Code (Imperial): 0201; Packaging: Cut Tape; Package Quantity: 15000; Current Rating: 100mA; Length: 0.024inch; Width: 0.012inch; Height: 0.013inch; REACH SVHC: No SVHC; Lead Free: Lead Free; RoHS Compliant: Yes; ComponentLink1URL: https://datasheet.ciiva.com/46381/1795294-46381669.pdf?src-supplier=Element14; ComponentLink1Description: https://datasheet.ciiva.com/46381/1795294-46381669.pdf?src-supplier=Element14; ComponentLink2URL: https://datasheet.ciiva.com/46634/beads-commercial-signal-mmz-en-46634390.pdf?src-supplier=Digi-Key; ComponentLink2Description: https://datasheet.ciiva.com/46634/beads-commercial-signal-mmz-en-46634390.pdf?src-supplier=Digi-Key; ComponentLink3URL: https://datasheet.ciiva.com/48682/beads-commercial-signal-mmz-en-48682603.pdf?src-supplier=Avnet; ComponentLink3Description: https://datasheet.ciiva.com/48682/beads-commercial-signal-mmz-en-48682603.pdf?src-supplier=Avnet; ComponentLink4URL: https://datasheet.ciiva.com/46634/beads-commercial-signal-mmz-en-46634381.pdf?src-supplier=Digi-Key; ComponentLink4Description: https://datasheet.ciiva.com/46634/beads-commercial-signal-mmz-en-46634381.pdf?src-supplier=Digi-Key; Supplier Part Number 1: 445-2146-1-ND
footprint IND 0201
pins: 1, 2

## PA2512JKF7W0R001E
designator R?, comment 1mR
RES 0.001 OHM 5% 2W 2512; Manufacturer: Yageo; Manufacturer Part Number: PA2512JKF7W0R001E; Temperature Coefficient: 100ppm/°C; Supplier 1: Avnet; RoHS: Yes; Category: Chip SMD Resistors; Pricing 1: 4000=0.16255, 8000=0.15806, 16000=0.15358, 24000=0.14909, 32000=0.14461 (USD); Case/Package: 2512; Min Operating Temperature: -55°C; Max Operating Temperature: 170°C; Packaging: Tape and Reel; Resistance: 1mR; Resistor Type: Thin Film; Number of Terminations: 2; Tolerance: 5%; Max Power Dissipation: 2W; Features: Moisture Resistant,Automotive AEC-Q200; Length: 0.25inch; Width: 0.125inch; Height: 0.035inch; RoHS Compliant: Yes; ComponentLink1URL: http://www.mouser.com/ds/2/447/PYu-PA_E_51_RoHS_5-1077983.pdf?src-supplier=Mouser; ComponentLink1Description: http://www.mouser.com/ds/2/447/PYu-PA_E_51_RoHS_5-1077983.pdf?src-supplier=Mouser; ComponentLink2URL: http://www.yageo.com/documents/recent/PYu-PA_E_51_RoHS_6.pdf?src-supplier=Digi-Key; ComponentLink2Description: http://www.yageo.com/documents/recent/PYu-PA_E_51_RoHS_6.pdf?src-supplier=Digi-Key; Supplier Part Number 1: PA2512JKF7W0R001E
footprint RES 2512 (0.033O ±1% 2W ±1800ppm/°C 2512 Low Resistors & Current Sense Resistors - Surface Mount RoHS)
pins: 1, 2

## PTFR0603B5K60P9
designator R?, comment 5.6K
100mW Thin Film Resistor 100V 5.6kΩ 0603 Chip Resistor; Manufacturer Part Number: PTFR0603B5K60P9; Manufacturer: Resistor; Value: 5.6K; Footprint: 0603; ComponentLink1Description: LCSC; ComponentLink1URL: https://lcsc.com/product-detail/Chip-span-style-background-color-ff0-Resistor-span-Surface-Mount_span-style-background-color-ff0-Resistor-span-Today-PTFR0603B5K60P9_C351638.html
footprint Res0603
pins: 1, 2

## PZ254V-11-05P
designator J?
Pin Header 5 1 right-angle; Manufacturer: XFCN; Manufacturer Part Number: PZ254V-11-05P; ComponentLink1Description: LCSC; ComponentLink1URL: https://lcsc.com/product-detail/Pin-Headers_XFCN-PZ254V-11-05P_C492404.html; Footprint: Custom
footprint HDR1X5 (Through Hole,P=2.54mm)
pins: 1, 2, 3, 4, 5

## RC0603FR-070RL
designator R?, comment 0R
RES SMD 0R, 1%, 0.1W, 0603; Manufacturer: Yageo; Manufacturer Part Number: RC0603FR-070RL; Resistance: 0mR; Power Rating: 100mW; Voltage Rating (DC): 50V; Temperature Coefficient: 200ppm/°C; Current Rating: 1A; Working Voltage: 75V; Supplier 1: Arrow Electronics; RoHS: Yes; Category: Chip SMD Resistors; Stock 1: 1270000; Pricing 1: 5000=0.00320, 5000=0.00490, 50000=0.00450, 500000=0.00250, 2500000=0.00150 (USD); Case/Package: 0603; Number of Pins: 2; Contact Plating: Tin,Matte; Case Code (Metric): 1608; Case Code (Imperial): 0603; Min Operating Temperature: -55°C; Max Operating Temperature: 155°C; Resistor Type: Thick Film; Packaging: Tape and Reel; Tolerance: 1%; Package Quantity: 5000; Voltage Rating: 50V; Number of Terminations: 2; Termination: SMD/SMT; Max Power Dissipation: 100mW; Features: Moisture Resistant; Length: 1.6mm; Width: 0.031inch; Height: 0.45mm; Depth: 0.8mm; Radiation Hardening: No; REACH SVHC: No SVHC; Lead Free: Lead Free; Military Standard: Not; ComponentLink1URL: https://datasheet.ciiva.com/11808/0900766b80f96399-11808172.pdf?src-supplier=RSComponents; ComponentLink1Description: https://datasheet.ciiva.com/11808/0900766b80f96399-11808172.pdf?src-supplier=RSComponents; ComponentLink2URL: https://datasheet.ciiva.com/5558/rc0603-272842-5558341.pdf?src-supplier=Mouser; ComponentLink2Description: https://datasheet.ciiva.com/5558/rc0603-272842-5558341.pdf?src-supplier=Mouser; ComponentLink3URL: https://datasheet.ciiva.com/46382/443971-46382072.pdf?src-supplier=Element14; ComponentLink3Description: https://datasheet.ciiva.com/46382/443971-46382072.pdf?src-supplier=Element14; ComponentLink4URL: https://datasheet.ciiva.com/29721/pyu-r-int-thick-7-29721178.pdf?src-supplier=Digi-Key; ComponentLink4Description: https://datasheet.ciiva.com/29721/pyu-r-int-thick-7-29721178.pdf?src-supplier=Digi-Key; ComponentLink5URL: https://datasheet.ciiva.com/5684/443971-5684699.pdf?src-supplier=Farnell; ComponentLink5Description: https://datasheet.ciiva.com/5684/443971-5684699.pdf?src-supplier=Farnell; ComponentLink6URL: https://datasheet.ciiva.com/7983/443971-7983627.pdf?src-supplier=Element14; ComponentLink6Description: https://datasheet.ciiva.com/7983/443971-7983627.pdf?src-supplier=Element14; ComponentLink7URL: https://datasheet.ciiva.com/29721/pyu-rc0603-51-rohs-l-4-29721179.pdf?src-supplier=Digi-Key; ComponentLink7Description: https://datasheet.ciiva.com/29721/pyu-rc0603-51-rohs-l-4-29721179.pdf?src-supplier=Digi-Key; ComponentLink8URL: https://datasheet.ciiva.com/22643/1868787-22643388.pdf?src-supplier=Element14; ComponentLink8Description: https://datasheet.ciiva.com/22643/1868787-22643388.pdf?src-supplier=Element14; Supplier Part Number 1: RC0603FR-070RL
footprint Res0603
pins: 1, 2

## RC0603FR-071ML
designator R?, comment 1M
RES SMD 1M OHM 1% 1/10W 0603; Manufacturer: Yageo; Manufacturer Part Number: RC0603FR-071ML; Voltage Rating: 50V; Resistance: 1MR; Power Rating: 100mW; Temperature Coefficient: 100ppm/°C; Supplier 1: Digi-Key; Stock 1: 3824601; Pricing 1: 1=0.1, 10=0.023, 100=0.0094, 1000=0.00421, 2500=0.00366 (USD); Case/Package: 0603; Number of Pins: 2; Case Code (Imperial): 0603; Case Code (Metric): 1608; Min Operating Temperature: -55°C; Max Operating Temperature: 155°C; Voltage Rating (DC): 50V; Tolerance: 1%; Packaging: Tape and Reel; Package Quantity: 5000; Termination: SMD/SMT; Composition: Thick Film; Military Standard: Not; Length: 1.6mm; Height: 0.45mm; Width: 0.8mm; Depth: 0.8mm; REACH SVHC: No SVHC; Lead Free: Lead Free; ComponentLink1URL: http://www.farnell.com/datasheets/2167052.pdf?src-supplier=Mouser; ComponentLink1Description: http://www.farnell.com/datasheets/2167052.pdf?src-supplier=Mouser; ComponentLink2URL: http://www.farnell.com/datasheets/2167052.pdf?src-supplier=Element14; ComponentLink2Description: http://www.farnell.com/datasheets/2167052.pdf?src-supplier=Element14; ComponentLink3URL: http://documents.rs-components.com/techlib://itc_doclist_GB.htm?stockno=5048956&src-supplier=RSComponents; ComponentLink3Description: http://documents.rs-components.com/techlib://itc_doclist_GB.htm?stockno=5048956&src-supplier=RSComponents; Supplier Part Number 1: 311-1.00MHRDKR-ND; LCSC Part Number: C105578
footprint Res-0603
footprint Res0603
pins: 1, 2

## RC0603FR-072K2L
designator R?, comment 2.2K
RES SMD 2.2K OHM 1% 1/10W 0603; Manufacturer: Yageo Phycomp; Manufacturer Part Number: RC0603FR-072K2L; Temperature Coefficient: 100ppm/°C; Resistance: 2.2kR; Power Rating: 100mW; Voltage Rating (DC): 50V; Supplier 1: Digi-Key; Stock 1: 10587920; Pricing 1: 1=0.1, 10=0.023, 100=0.0094, 1000=0.00421, 2500=0.00366 (USD); Mount: Surface Mount; Case/Package: 0603; Number of Pins: 2; Min Operating Temperature: -55°C; Max Operating Temperature: 155°C; Tolerance: 1%; Packaging: Cut Tape; Length: 1.6mm; Height: 0.45mm; Width: 800um; Depth: 0.8mm; REACH SVHC: No SVHC; Lead Free: Lead Free; Supplier Part Number 1: 311-2.20KHRCT-ND
footprint Res0603
pins: 1, 2

## RC0603FR-0710RL
designator R?, comment 10R
RES SMD 10 OHM 1% 1/10W 0603; Manufacturer: Yageo; Manufacturer Part Number: RC0603FR-0710RL; Temperature Coefficient: 200ppm/°C; Power Rating: 100mW; Voltage Rating: 50V; Supplier 1: Digi-Key; Stock 1: 10836596; Pricing 1: 1=0.1, 10=0.046, 100=0.0187, 1000=0.0084, 2500=0.00729 (USD); Case/Package: 0603; Number of Pins: 2; Case Code (Imperial): 0603; Case Code (Metric): 1608; Contact Plating: Tin,Matte; Min Operating Temperature: -55°C; Max Operating Temperature: 155°C; Resistance: 10R; Tolerance: 1%; Composition: Thick Film; Packaging: Tape and Reel; Voltage Rating (DC): 50V; Termination: SMD/SMT; Military Standard: Not; Length: 1.6mm; Height: 0.45mm; Width: 0.8mm; Depth: 0.8mm; Radiation Hardening: No; Lead Free: Lead Free; REACH SVHC: No SVHC; ComponentLink1URL: http://www.farnell.com/datasheets/1868787.pdf?src-supplier=Element14; ComponentLink1Description: http://www.farnell.com/datasheets/1868787.pdf?src-supplier=Element14; ComponentLink2URL: http://www.yageo.com/documents/recent/PYu-RC0603_51_RoHS_L_4.pdf?src-supplier=Avnet; ComponentLink2Description: http://www.yageo.com/documents/recent/PYu-RC0603_51_RoHS_L_4.pdf?src-supplier=Avnet; ComponentLink3URL: http://documents.rs-components.com/techlib://itc_doclist_GB.htm?stockno=5048984&src-supplier=RSComponents; ComponentLink3Description: http://documents.rs-components.com/techlib://itc_doclist_GB.htm?stockno=5048984&src-supplier=RSComponents; ComponentLink4URL: http://www.yageo.com/documents/recent/PYu-RC0603_51_RoHS_L_4.pdf?src-supplier=Avnet+Europe; ComponentLink4Description: http://www.yageo.com/documents/recent/PYu-RC0603_51_RoHS_L_4.pdf?src-supplier=Avnet+Europe; Supplier Part Number 1: 311-10.0HRDKR-ND
footprint Res0603
pins: 1, 2

## RC0603FR-0733RL
designator R?, comment 33R
RES SMD 33 OHM 1% 1/10W 0603; Manufacturer: Yageo; Manufacturer Part Number: RC0603FR-0733RL; Temperature Coefficient: 100ppm/°C; Voltage Rating (DC): 50V; Power Rating: 100mW; Voltage Rating: 75V; Supplier 1: Digi-Key; Stock 1: 5529439; Pricing 1: 1=0.1, 10=0.023, 100=0.0094, 1000=0.00421, 2500=0.00366 (USD); Case/Package: 0603; Number of Pins: 2; Weight: 7.1E-05oz; Case Code (Metric): 1608; Case Code (Imperial): 0603; Min Operating Temperature: -55°C; Max Operating Temperature: 155°C; Resistance: 33R; Tolerance: 1%; Composition: Thick Film; Packaging: Tape and Reel; Package Quantity: 1; Number of Terminations: 2; Termination: SMD/SMT; Military Standard: Not; Max Power Dissipation: 100mW; Features: Moisture Resistant; Length: 1.6mm; Height: 0.45mm; Width: 0.8mm; Depth: 0.8mm; Lead Pitch: 0.3mm; REACH SVHC: No SVHC; Lead Free: Lead Free; ComponentLink1URL: http://www.yageo.com/documents/recent/PYu-RC_Group_51_RoHS_L_10.pdf?src-supplier=Digi-Key; ComponentLink1Description: http://www.yageo.com/documents/recent/PYu-RC_Group_51_RoHS_L_10.pdf?src-supplier=Digi-Key; ComponentLink2URL: http://documents.rs-components.com/techlib://itc_doclist_GB.htm?stockno=5046562&src-supplier=RSComponents; ComponentLink2Description: http://documents.rs-components.com/techlib://itc_doclist_GB.htm?stockno=5046562&src-supplier=RSComponents; ComponentLink3URL: http://www.farnell.com/datasheets/38590.pdf?src-supplier=Element14; ComponentLink3Description: http://www.farnell.com/datasheets/38590.pdf?src-supplier=Element14; ComponentLink4URL: https://www.verical.com/server-webapp/html/getDatasheet?partID=326673&src-supplier=Verical; ComponentLink4Description: https://www.verical.com/server-webapp/html/getDatasheet?partID=326673&src-supplier=Verical; ComponentLink5URL: http://www.farnell.com/datasheets/1868787.pdf?src-supplier=Element14; ComponentLink5Description: http://www.farnell.com/datasheets/1868787.pdf?src-supplier=Element14; ComponentLink6URL: http://www.farnell.com/datasheets/2167052.pdf?src-supplier=Element14; ComponentLink6Description: http://www.farnell.com/datasheets/2167052.pdf?src-supplier=Element14; ComponentLink7URL: http://www.farnell.com/datasheets/443971.pdf?src-supplier=Element14; ComponentLink7Description: http://www.farnell.com/datasheets/443971.pdf?src-supplier=Element14; Supplier Part Number 1: 311-33.0HRCT-ND
footprint Res0603
pins: 1, 2

## RC0603FR-0747RL
designator R?, comment 47R
RES SMD 47OHM 0.1W 0603; Manufacturer: Yageo; Manufacturer Part Number: RC0603FR-0747RL; Tolerance: 1%; Power Rating: 100mW; Voltage Rating (DC): 50V; Temperature Coefficient: 100ppm/°C; Voltage Rating: 75V; Supplier 1: Digi-Key; RoHS: Yes; Category: Chip SMD Resistors; Stock 1: 596562; Pricing 1: 1=0.10000, 10=0.02400, 100=0.00970, 1000=0.00436, 2500=0.00378 (USD); Case/Package: 0603; Number of Pins: 2; Case Code (Imperial): 0603; Case Code (Metric): 1608; Weight: 7.1E-05oz; Size Code: 0603; Min Operating Temperature: -55°C; Max Operating Temperature: 155°C; Resistance: 47R; Packaging: Tape and Reel; Package Quantity: 1; Termination: SMD/SMT; Resistor Type: Thick Film; Number of Terminations: 2; Max Power Dissipation: 100mW; Features: Moisture Resistant; Series: RC; Construction: Rectangular; Resistance Tolerance: 1%; Length: 1.6mm; Width: 0.8mm; Height: 0.022inch; Depth: 0.8mm; REACH SVHC: Unknown; Lead Free: Lead Free; Military Standard: Not; RoHS Compliant: Yes; ComponentLink1URL: https://datasheet.ciiva.com/2453/pyu-r-int-thick-7-2453922.pdf?src-supplier=Digi-Key; ComponentLink1Description: https://datasheet.ciiva.com/2453/pyu-r-int-thick-7-2453922.pdf?src-supplier=Digi-Key; ComponentLink2URL: https://datasheet.ciiva.com/2453/pyu-r-int-thick-7-2453923.pdf?src-supplier=Digi-Key; ComponentLink2Description: https://datasheet.ciiva.com/2453/pyu-r-int-thick-7-2453923.pdf?src-supplier=Digi-Key; ComponentLink3URL: https://datasheet.ciiva.com/2453/pyu-r-int-thick-7-2453924.pdf?src-supplier=Digi-Key; ComponentLink3Description: https://datasheet.ciiva.com/2453/pyu-r-int-thick-7-2453924.pdf?src-supplier=Digi-Key; ComponentLink4URL: https://datasheet.ciiva.com/7746/443971-7746363.pdf?src-supplier=Element14; ComponentLink4Description: https://datasheet.ciiva.com/7746/443971-7746363.pdf?src-supplier=Element14; ComponentLink5URL: https://datasheet.ciiva.com/7746/443971-7746364.pdf?src-supplier=Element14; ComponentLink5Description: https://datasheet.ciiva.com/7746/443971-7746364.pdf?src-supplier=Element14; ComponentLink6URL: https://datasheet.ciiva.com/46440/1868787-46440908.pdf?src-supplier=Element14; ComponentLink6Description: https://datasheet.ciiva.com/46440/1868787-46440908.pdf?src-supplier=Element14; Supplier Part Number 1: 311-47.0HRCT-ND
footprint Res0603
pins: 1, 2